# Altium schematic symbol library SMAJ15CA.SchLib: 1 symbol
Pins are listed as number, name and electrical type; pins without a type are passive.

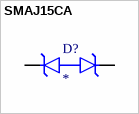
[diagram p0: symbol SMAJ15CA]

## SMAJ15CA
designator D?
SMAJ15CA, Bi-Directional TVS Diode, 400W, 2-Pin DO-214AC | Littelfuse SMAJ15CA
footprint DIOM4325X250N
pins: 1 (io), 2 (io)